# Altium schematic symbol library buttons.SchLib: 1 symbol
Pins are listed as number, name and electrical type; pins without a type are passive.

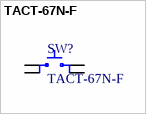
[diagram p0: symbol TACT-67N-F]

## TACT-67N-F
designator SW?
Microswitch TACT; SPST-NO; Pos: 2; 0.05A/12VDC; THT; none; 1.6N
footprint TACT-67N-F (Microswitch TACT; SPST-NO; Pos: 2; 0.05A/12VDC; THT; none; 1.6N)
pins: 1, 2, 3, 4